# Altium footprint library SB0037A.PcbLib: 74 footprints (part 5 of 5)
Each footprint in its own frame and in the unit in brackets; x right, y up, seen from the top. Pads: shape width x height; smd on the part's side, far side on the other; paste and mask are expansions set on the pad; w line width, h text height; cw(c..) or ccw(c..) is an arc to the next point about the centre after c.
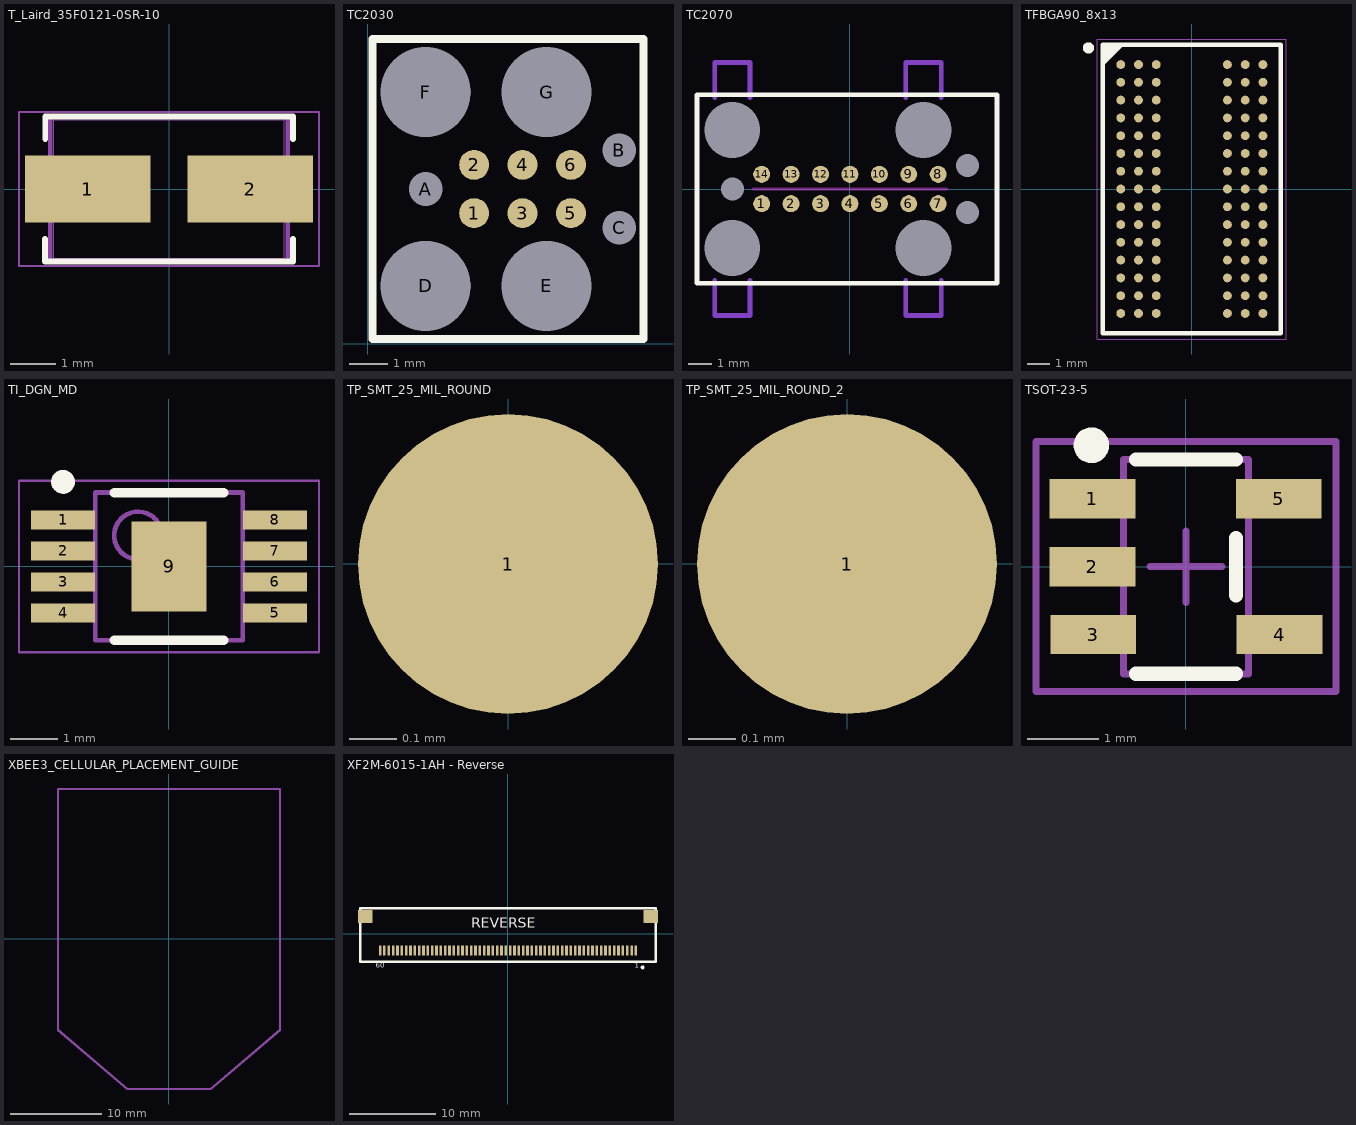
[diagram p4: the footprints below, top view; thin cyan lines are the x and y axes]

## T_Laird_35F0121-0SR-10 [mm] "Power supply FB 10A"
height 3.05
pads (2):
  rect 2.77x1.47 smd: 1(-1.79,0) 2(1.79,0)
Top Overlay:
  lines w0.127: -2.732,-1.102 -2.732,-1.599 2.73,-1.599 2.73,-1.104 ; -2.729,1.104 -2.729,1.599 2.73,1.599 2.73,1.104
Mechanical 1:
  lines w0.05: -3.306,-1.695 3.305,-1.695 3.305,1.695 -3.306,1.695 -3.306,-1.695
Mechanical 3:
  lines w0.1: -2.614,-1.599 -2.614,1.599 2.614,1.599 2.614,-1.599 -2.614,-1.599
Mechanical 15:
  lines w0.001: -2.54,-1.525 -2.54,1.525 2.54,1.525 2.54,-1.525 -2.54,-1.525
3D body: height 3.05, standoff 0, extent -2.54,-1.525 2.54,1.525

## TC2030 [mil] "TC2030-MCP"
pads (13):
  round 31 smd paste-40: 1(110,135) 2(110,185) 3(160,135) 4(160,185) 5(210,135) 6(210,185)
  round 34 hole 35 unplated: A(60,160) B(260,200) C(260,120)
  round 92 hole 93 unplated: D(60,60) E(185,60) F(60,260) G(185,260)
Top Overlay:
  lines w7.87: 5,5 5,315 285,315 285,5 5,5
Mechanical 1:
  circle w10: c60,260 r36.06

## TC2070 [mil] "TC2070 14-PIN TAG-CONNECT WITH LEGS"
pads (21):
  round 10 hole 95 unplated mask+45: 0(-200,-100) 0(-200,100) 0(125,-100) 0(125,100)
  round 10 hole 39 unplated mask+18: 0(-200,0) 0(200,-40) 0(200,40)
  round 29 smd paste-40: 1(-150,-25) 2(-100,-25) 3(-50,-25) 4(0,-25) 5(50,-25) 6(100,-25) 7(150,-25) 8(150,25) 9(100,25) 10(50,25) 11(0,25) 12(-50,25) 13(-100,25) 14(-150,25)
Top Layer keep-out:
  lines w5: -165,0 165,0
Bottom Layer keep-out:
  lines w8: -230,-155 -230,-215 -200,-215 -170,-215 -170,-155 ; -230,155 -230,215 -200,215 -170,215 -170,155 ; 95,-155 95,-215 125,-215 155,-215 155,-155 ; 95,155 95,215 125,215 155,215 155,155
Top Overlay:
  lines w7.87: -260,-160 250,-160 250,160 -260,160 -260,-160

## TFBGA90_8x13 [mm] "TF-BGA, 90-Leads, Body 8.00x13.00mmx1.20mm, Pitch 0.80mm"
height 1.2
pads (90):
  round 0.4 smd: A1(-3.2,5.6) A2(-2.4,5.6) A3(-1.6,5.6) A7(1.6,5.6) A8(2.4,5.6) A9(3.2,5.6) B1(-3.2,4.8) B2(-2.4,4.8) B3(-1.6,4.8) B7(1.6,4.8) B8(2.4,4.8) B9(3.2,4.8) C1(-3.2,4) C2(-2.4,4) C3(-1.6,4) C7(1.6,4) C8(2.4,4) C9(3.2,4) D1(-3.2,3.2) D2(-2.4,3.2) D3(-1.6,3.2) D7(1.6,3.2) D8(2.4,3.2) D9(3.2,3.2) E1(-3.2,2.4) E2(-2.4,2.4) E3(-1.6,2.4) E7(1.6,2.4) E8(2.4,2.4) E9(3.2,2.4) F1(-3.2,1.6) F2(-2.4,1.6) F3(-1.6,1.6) F7(1.6,1.6) F8(2.4,1.6) F9(3.2,1.6) G1(-3.2,0.8) G2(-2.4,0.8) G3(-1.6,0.8) G7(1.6,0.8) G8(2.4,0.8) G9(3.2,0.8) H1(-3.2,0) H2(-2.4,0) H3(-1.6,0) H7(1.6,0) H8(2.4,0) H9(3.2,0) J1(-3.2,-0.8) J2(-2.4,-0.8) J3(-1.6,-0.8) J7(1.6,-0.8) J8(2.4,-0.8) J9(3.2,-0.8) K1(-3.2,-1.6) K2(-2.4,-1.6) K3(-1.6,-1.6) K7(1.6,-1.6) K8(2.4,-1.6) K9(3.2,-1.6) L1(-3.2,-2.4) L2(-2.4,-2.4) L3(-1.6,-2.4) L7(1.6,-2.4) L8(2.4,-2.4) L9(3.2,-2.4) M1(-3.2,-3.2) M2(-2.4,-3.2) M3(-1.6,-3.2) M7(1.6,-3.2) M8(2.4,-3.2) M9(3.2,-3.2) N1(-3.2,-4) N2(-2.4,-4) N3(-1.6,-4) N7(1.6,-4) N8(2.4,-4) N9(3.2,-4) P1(-3.2,-4.8) P2(-2.4,-4.8) P3(-1.6,-4.8) P7(1.6,-4.8) P8(2.4,-4.8) P9(3.2,-4.8) R1(-3.2,-5.6) R2(-2.4,-5.6) R3(-1.6,-5.6) R7(1.6,-5.6) R8(2.4,-5.6) R9(3.2,-5.6)
Top Overlay:
  circle w0.25: c-4.65,6.35 r0.125
  region: -3.156,6.5 -4,5.656 -4,6.5
  lines w0.2: -4,5.656 -3.156,6.5 ; -4,-6.5 -4,6.5 4,6.5 4,-6.5 -4,-6.5
Mechanical 13:
  lines w0.1: -4,-6.5 -4,6.5 4,6.5 4,-6.5 -4,-6.5
Mechanical 15:
  lines w0.05: -4.25,-6.75 -4.25,6.75 4.25,6.75 4.25,-6.75 -4.25,-6.75
3D body "BGA90-8X13mm.step": height 0.96, standoff -0.02, extent -4,-6.5 4,6.5

## TI_DGN_MD [mm] "HVSSOP, 8-Leads, Body 3.00x3.00mm, Pitch 0.65mm, Thermal Pad 1.89x1.57mm, IPC Medium Density"
height 1.1
pads (9):
  rect 1.35x0.4 smd: 1(-2.225,0.975) 2(-2.225,0.325) 3(-2.225,-0.325) 4(-2.225,-0.975) 5(2.225,-0.975) 6(2.225,-0.325) 7(2.225,0.325) 8(2.225,0.975)
  rect 1.57x1.89 smd: 9(0,0)
Top Overlay:
  circle w0.25: c-2.225,1.775 r0.125
  lines w0.2: -1.15,-1.55 1.15,-1.55 ; -1.15,1.55 1.15,1.55
Top Courtyard:
  lines w0.05: -3.15,-1.8 -3.15,1.8 3.15,1.8 3.15,-1.8 -3.15,-1.8
  lines w0.1: -0.5,0 0.5,0 ; 0,-0.5 0,0.5
Top Assembly:
  circle w0.1: c-0.65,0.65 r0.5
  lines w0.1: -1.55,-1.55 -1.55,1.55 1.55,1.55 1.55,-1.55 -1.55,-1.55
3D body "TI_DGN_MD.step": height 1.1, standoff 0, extent -2.45,-1.55 2.45,1.55

## TP_SMT_25_MIL_ROUND [mm]
height 7.45
pads (1):
  round 0.635 smd paste-0.635: 1(0,0)

## TP_SMT_25_MIL_ROUND_2 [mm]
pads (1):
  round 0.635 smd paste-0.635: 1(0,0)

## TSOT-23-5 [mm] "SOT23, 5-Leads, Body 3.0x2.9mm (max), Pitch 0.95mm, IPC Medium Density"
height 1.1
pads (5):
  rect 1.2x0.55 smd: 1(-1.31,0.95) 2(-1.31,0) 3(-1.3,-0.95) 4(1.31,-0.95) 5(1.3,0.95)
Top Overlay:
  circle w0.25: c-1.325,1.7 r0.125
  lines w0.2: -0.7,-1.5 0.7,-1.5 ; -0.7,1.5 0.7,1.5 ; 0.7,-0.4 0.7,0.4
Top Courtyard:
  lines w0.1: -0.5,0 0.5,0 ; 0,-0.5 0,0.5 ; -2.1,-1.75 -2.1,1.75 2.1,1.75 2.1,-1.75 -2.1,-1.75
Mechanical 13:
  lines w0.1: -0.875,-1.5 -0.875,1.5 0.875,1.5 0.875,-1.5 -0.875,-1.5
3D body "TSOT-23-5.STEP": height 0.94, standoff -0.02, extent -1.566,-1.488 1.625,1.412

## XBEE3_CELLULAR_PLACEMENT_GUIDE [mm] "Placement guide for the XBEE3 cell module"
height 1.6
Bottom Overlay:
  circle w0.254: c10.998,-8.763 r0.508
  circle w0.254: c10.998,-6.763 r0.508
  circle w0.254: c10.998,-4.763 r0.508
  circle w0.254: c10.998,-2.763 r0.508
  circle w0.254: c10.998,-0.763 r0.508
  circle w0.254: c10.998,1.237 r0.508
  circle w0.254: c10.998,3.237 r0.508
  circle w0.254: c10.998,5.237 r0.508
  circle w0.254: c10.998,7.237 r0.508
  circle w0.254: c10.998,9.237 r0.508
  circle w0.254: c-10.998,9.237 r0.508
  circle w0.254: c-10.998,7.237 r0.508
  circle w0.254: c-10.998,5.237 r0.508
  circle w0.254: c-10.998,3.237 r0.508
  circle w0.254: c-10.998,1.237 r0.508
  circle w0.254: c-10.998,-0.763 r0.508
  circle w0.254: c-10.998,-2.763 r0.508
  circle w0.254: c-10.998,-4.763 r0.508
  circle w0.254: c-10.998,-6.763 r0.508
  circle w0.254: c-10.998,-8.763 r0.508
Mechanical 16:
  lines w0.254: -12.192,-10.008 -12.192,16.485 12.192,16.485 12.192,-10.008 4.572,-16.485 -4.572,-16.485 -12.192,-10.008

## XF2M-6015-1AH - Reverse [mm] "FFC Connector 0.5mm pitch for bottom LCD feedthrough"
height 2
pads (62):
  rect 0.3x1.1 smd: 1(14.75,-1.95) 2(14.25,-1.95) 3(13.75,-1.95) 4(13.25,-1.95) 5(12.75,-1.95) 6(12.25,-1.95) 7(11.75,-1.95) 8(11.25,-1.95) 9(10.75,-1.95) 10(10.25,-1.95) 11(9.75,-1.95) 12(9.25,-1.95) 13(8.75,-1.95) 14(8.25,-1.95) 15(7.75,-1.95) 16(7.25,-1.95) 17(6.75,-1.95) 18(6.25,-1.95) 19(5.75,-1.95) 20(5.25,-1.95) 21(4.75,-1.95) 22(4.25,-1.95) 23(3.75,-1.95) 24(3.25,-1.95) 25(2.75,-1.95) 26(2.25,-1.95) 27(1.75,-1.95) 28(1.25,-1.95) 29(0.75,-1.95) 30(0.25,-1.95) 31(-0.25,-1.95) 32(-0.75,-1.95) 33(-1.25,-1.95) 34(-1.75,-1.95) 35(-2.25,-1.95) 36(-2.75,-1.95) 37(-3.25,-1.95) 38(-3.75,-1.95) 39(-4.25,-1.95) 40(-4.75,-1.95) 41(-5.25,-1.95) 42(-5.75,-1.95) 43(-6.25,-1.95) 44(-6.75,-1.95) 45(-7.25,-1.95) 46(-7.75,-1.95) 47(-8.25,-1.95) 48(-8.75,-1.95) 49(-9.25,-1.95) 50(-9.75,-1.95) 51(-10.25,-1.95) 52(-10.75,-1.95) 53(-11.25,-1.95) 54(-11.75,-1.95) 55(-12.25,-1.95) 56(-12.75,-1.95) 57(-13.25,-1.95) 58(-13.75,-1.95) 59(-14.25,-1.95) 60(-14.75,-1.95)
  rect 1.7x1.5 smd: ""(-16.45,1.95) ""(16.45,1.95)
Top Overlay:
  circle w0.2: c15.525,-3.9 r0.125
  lines w0.254: -17.05,-3.25 -17.05,2.925 17.05,2.925 17.05,-3.25 -17.05,-3.25
  text "REVERSE" at -4.25,0.249 h2
  text "60" at -15.225,-4.175 h1.02
  text "1" at 14.625,-4.175 h1.02
Mechanical 3:
  lines w0.1: 6.6,-1.95 6.75,-1.8
3D body "XF2M_6015_1AH.step": height 2.1, standoff 0, extent -17.05,-3.275 17.05,2.925